# EAGLE library part AP33771CFBZ-13-FA02 (library AP33771CFBZ-13-FA02)
USB, Type-C Controller PMIC 2.75V ~ 3.25V, 3.3V ~ 5.33V, 4.37V ~ 31V -40C ~ 85C (TA) W-DFN3030-14 (Type A1) Source: Datasheet <https://www.diodes.com/datasheet/download/AP33771C.pdf>
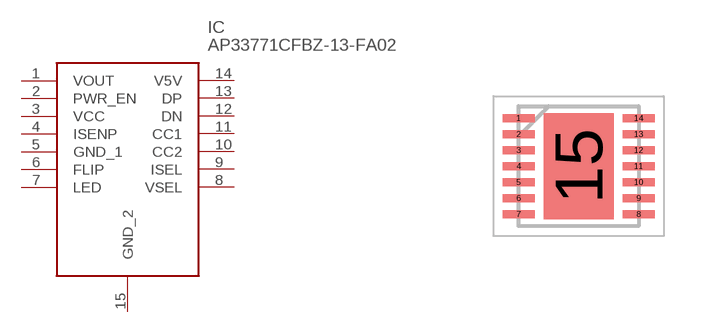
[diagram p0: symbol with the pads of SON40P300X300X80-15N; footprint SON40P300X300X80-15N]

Designator prefix IC

## AP33771CFBZ-13-FA02 (Description: USB, Type-C Controller PMIC 2.75V ~ 3.25V, 3.3V ~ 5.33V, 4.37V ~ 31V -40C ~ 85C (TA) W-DFN3030-14 (Type A1); Height: 0.8mm; Manufacturer_Name: Diodes Incorporated; Manufacturer_Part_Number: AP33771CFBZ-13-FA02)  [SON40P300X300X80-15N]
1  VOUT
2  PWR_EN
3  VCC
4  ISENP
5  GND_1
6  FLIP
7  LED
8  VSEL
9  ISEL
10  CC2
11  CC1
12  DN
13  DP
14  V5V
15  GND_2

## Footprint SON40P300X300X80-15N (pad centres in mm)
W-DFN3030-14 (Type A1)
smd 0.8 x 0.2: 1 -1.5,1.2; 2 -1.5,0.8; 3 -1.5,0.4; 4 -1.5,0; 5 -1.5,-0.4; 6 -1.5,-0.8; 7 -1.5,-1.2; 8 1.5,-1.2; 9 1.5,-0.8; 10 1.5,-0.4; 11 1.5,0; 12 1.5,0.4; 13 1.5,0.8; 14 1.5,1.2
smd 1.75 x 2.65: 15 0,0